# Altium schematic symbol library AD8671ARMZ-REEL.SchLib: 1 symbol
Pins are listed as number, name and electrical type; pins without a type are passive.

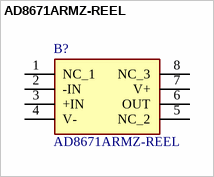
[diagram p0: symbol AD8671ARMZ-REEL]

## AD8671ARMZ-REEL
designator B?
Precision Low Noise, Low Input Bias Current, Single Op Amp; Manufacturer_Name: Analog Devices; Geometry.Height: 1.1mm; Mouser Part Number: 584-AD8671ARMZ-R; Mouser Price/Stock: https://www.mouser.co.uk/ProductDetail/Analog-Devices/AD8671ARMZ-REEL?qs=%2FtpEQrCGXCwLWWSTo5JWGg%3D%3D; Manufacturer_Part_Number: AD8671ARMZ-REEL; Datasheet Link: https://www.analog.com/AD8671/datasheet
footprint SOP65P490X110-8N
pins: 1 NC_1, 2 -IN, 3 +IN, 4 V-, 5 NC_2, 6 OUT, 7 V+, 8 NC_3